# Altium footprint library RLC.PcbLib: 32 footprints (part 1 of 2)
Each footprint in its own frame and in the unit in brackets; x right, y up, seen from the top. Pads: shape width x height; smd on the part's side, far side on the other; paste and mask are expansions set on the pad; w line width, h text height; cw(c..) or ccw(c..) is an arc to the next point about the centre after c.
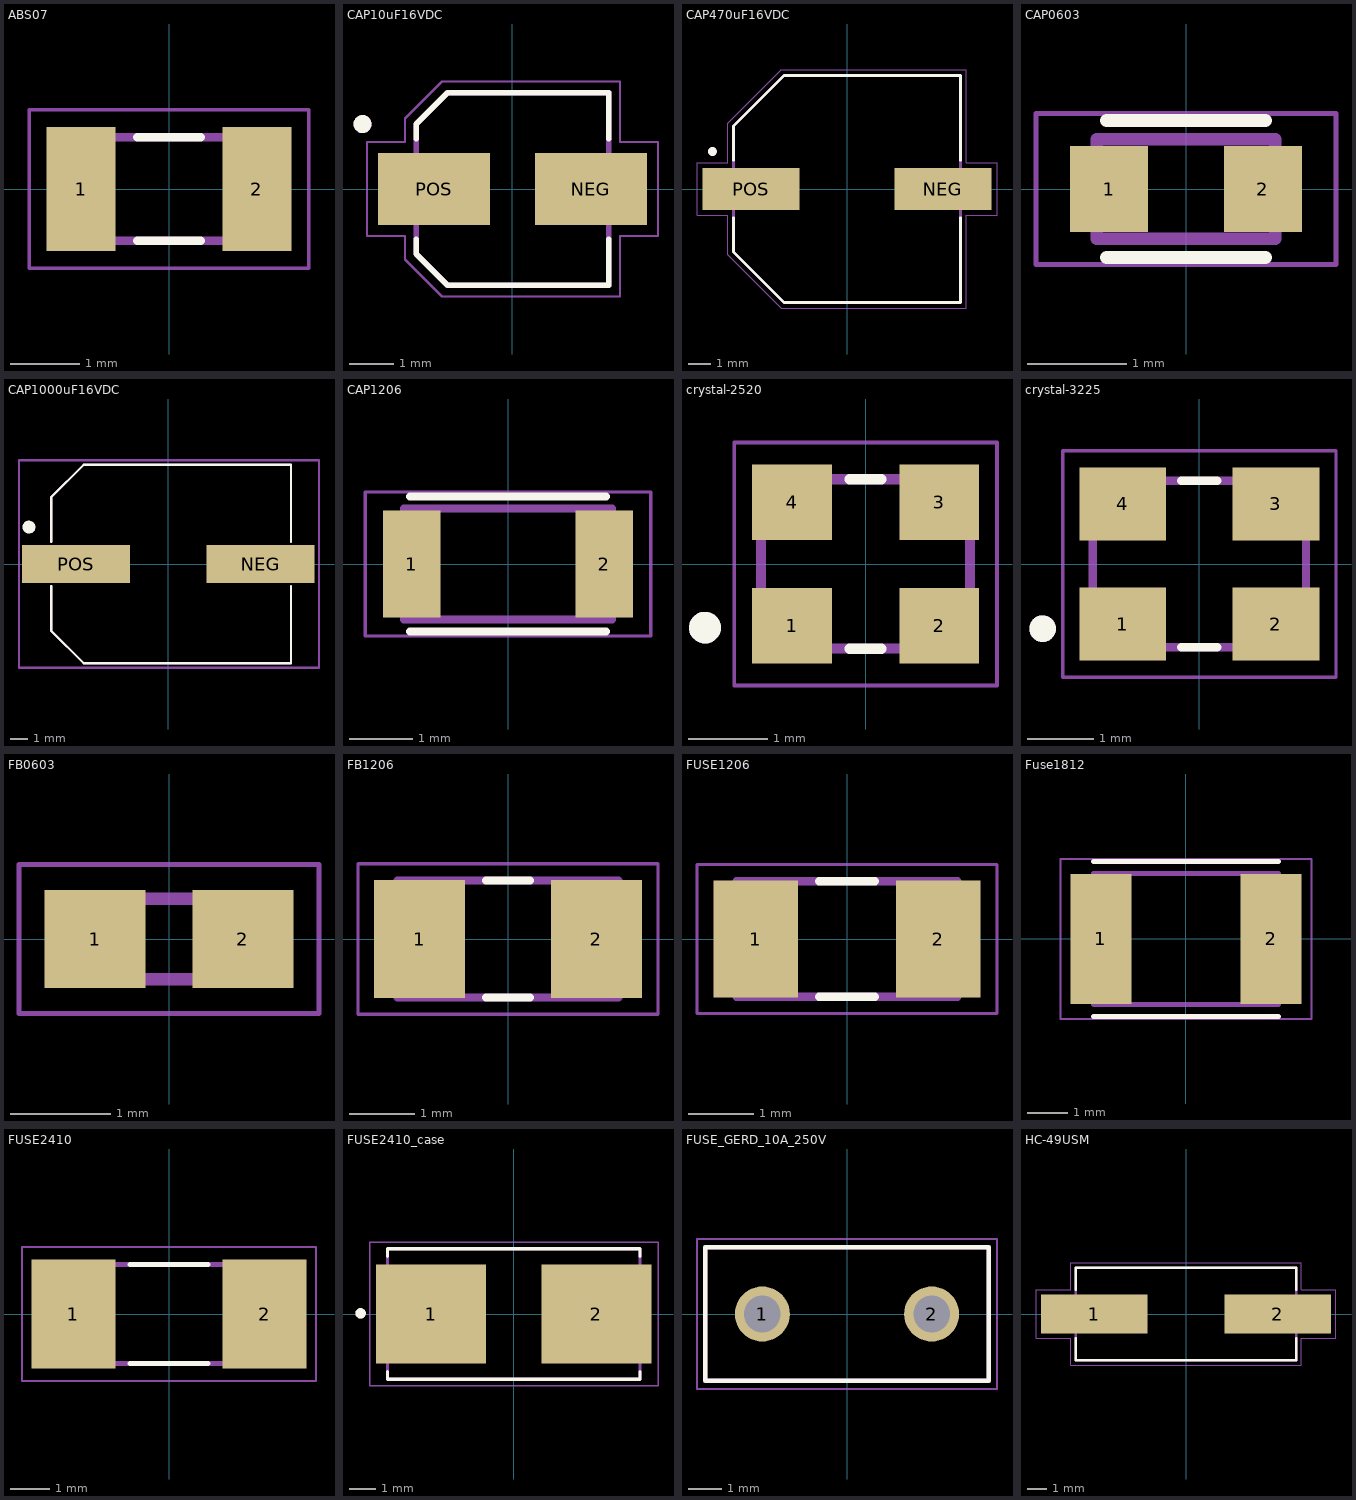
[diagram p0: the footprints below, top view; thin cyan lines are the x and y axes]

## ABS07 [mm] "ABS07"
height 0.9
pads (2):
  rect 1x1.8 smd: 1(-1.275,0) 2(1.275,0)
Top Overlay:
  lines w0.127: -0.455,-0.75 0.455,-0.75 ; -0.455,0.75 0.455,0.75
Mechanical 13:
  lines w0.127: -1.6,-0.75 1.6,-0.75 1.6,0.75 -1.6,0.75 -1.6,-0.75
Mechanical 15:
  lines w0.05: -2.025,-1.15 2.025,-1.15 2.025,1.15 -2.025,1.15 -2.025,-1.15
3D body "step_temp.STEP": height 0.9, standoff 0, extent -1.6,-0.75 1.6,0.75

## CAP10uF16VDC [mm] "CAP10uF16VDC"
pads (2):
  rect 2.5x1.6 smd: NEG(1.75,0) POS(-1.75,0)
Top Overlay:
  circle w0.2: c-3.35,1.45 r0.1
  lines w0.127: -2.15,-1.12 -2.15,-1.45 -1.45,-2.15 2.15,-2.15 2.15,-1.12 ; -2.15,1.12 -2.15,1.45 -1.45,2.15 2.15,2.15 2.15,1.12
Mechanical 13:
  circle w0.2: c-3.35,1.45 r0.1
  lines w0.127: -2.15,-1.45 -1.45,-2.15 2.15,-2.15 2.15,2.15 -1.45,2.15 -2.15,1.45 -2.15,-1.45
Mechanical 15:
  lines w0.05: -3.25,-1.05 -3.25,1.05 -2.4,1.05 -2.4,1.575 -1.575,2.4 2.4,2.4 2.4,1.05 3.25,1.05 3.25,-1.05 2.4,-1.05 2.4,-2.4 -1.575,-2.4 -2.4,-1.575 -2.4,-1.05 -3.25,-1.05
3D body "step_temp.STEP": height 5.84, standoff 0.04, extent -2.5,-2.15 2.5,2.15

## CAP470uF16VDC [mm] "CAP_16SVPE470M"
height 12.6
pads (2):
  rect 4.4x1.9 smd: NEG(4.35,0) POS(-4.35,0)
Top Overlay:
  circle w0.2: c-6.1,1.7 r0.1
  lines w0.127: -5.15,-1.3 -5.15,-2.85 -2.85,-5.15 5.15,-5.15 5.15,-1.3 ; -5.15,1.3 -5.15,2.85 -2.85,5.15 5.15,5.15 5.15,1.3
Mechanical 13:
  circle w0.2: c-6.1,1.7 r0.1
  lines w0.127: -5.15,-2.85 -2.85,-5.15 5.15,-5.15 5.15,5.15 -2.85,5.15 -5.15,2.85 -5.15,-2.85
Mechanical 15:
  lines w0.05: -6.8,-1.2 -5.4,-1.2 -5.4,-2.975 -2.975,-5.4 5.4,-5.4 5.4,-1.2 6.8,-1.2 6.8,1.2 5.4,1.2 5.4,5.4 -2.975,5.4 -5.4,2.975 -5.4,1.2 -6.8,1.2 -6.8,-1.2
3D body "step_temp.STEP": height 12.6, standoff 0, extent -5.5,-5.15 5.5,5.15

## CAP0603 [mil] "CAPC1608X50N"
pads (2):
  rect 31x34 smd: 1(-30.5,0) 2(30.5,0)
Top Overlay:
  lines w5: -31.5,-27.17 31.5,-27.17 ; -31.5,27.17 31.5,27.17
Mechanical 13:
  lines w5: -35.43,-19.68 35.43,-19.68 35.43,19.68 -35.43,19.68 -35.43,-19.68
Mechanical 15:
  lines w1.97: -59.45,-29.92 59.45,-29.92 59.45,29.92 -59.45,29.92 -59.45,-29.92
3D body "CAP0603.STEP": height 32.94, standoff 1.06, extent -31.5,-17.5 31.5,17.93

## CAP1000uF16VDC [mm] "CAP1000uF16VDC"
pads (2):
  rect 6.15x2.15 smd: NEG(5.252,0) POS(-5.252,0)
Top Overlay:
  circle w0.254: c-7.938,2.095 r0.09
  circle w0.254: c-7.954,2.1 r0.142
  circle w0.127: c-7.942,2.1 r0.305
  lines w0.127: -6.667,-1.27 -6.667,-3.81 -4.826,-5.651 6.985,-5.651 6.985,-1.27 ; -6.667,1.27 -6.667,3.81 -4.826,5.651 6.985,5.651 6.985,1.27
Mechanical 13:
  lines w0.127: -6.667,-1.27 -6.667,-3.81 -4.826,-5.651 6.985,-5.651 6.985,-1.3 ; -6.667,1.3 -6.667,3.81 -4.826,5.651 -3,5.651 6.985,5.651 6.985,1.27
Mechanical 15:
  lines w0.127: -8.509,-5.905 8.572,-5.905 8.572,5.905 -8.509,5.905 -8.509,-5.905
3D body "CAP1000uF16VDC.stp": height 10.72, standoff 0, extent -5.855,-5.155 5.855,5.155

## CAP1206 [mil] "CAPC3115X65N"
pads (2):
  rect 36x67 smd: 1(-60,0) 2(60,0)
Top Overlay:
  lines w5: -61.02,-41.93 61.02,-41.93 ; -61.02,41.93 61.02,41.93
Mechanical 13:
  lines w5: -64.96,-34.65 64.96,-34.65 64.96,34.65 -64.96,34.65 -64.96,-34.65
Mechanical 15:
  lines w1.97: -88.98,-44.88 88.98,-44.88 88.98,44.88 -88.98,44.88 -88.98,-44.88
3D body "CAP1206.step": height 39.37, standoff 0, extent -62.99,-31.5 62.99,31.5

## crystal-2520 [mm] "crystal-2520"
pads (4):
  rect 1x0.95 smd: 1(-0.925,-0.775) 2(0.925,-0.775) 3(0.925,0.775) 4(-0.925,0.775)
Top Overlay:
  circle w0.2: c-2.019,-0.8 r0.1
  lines w0.127: -0.2,-1.065 0.2,-1.065 ; -0.2,1.065 0.2,1.065
Mechanical 13:
  circle w0.2: c-2.019,-0.8 r0.1
  lines w0.127: -1.312,-1.063 1.312,-1.063 1.312,1.065 -1.312,1.065 -1.312,-1.063
Mechanical 15:
  lines w0.05: -1.651,-1.524 1.651,-1.524 1.651,1.524 -1.651,1.524 -1.651,-1.524
3D body "QFN_2520_4pins.STEP": height 0.8, standoff 0, extent -1.251,-1 1.251,1

## crystal-3225 [mm] "crystal-3225"
pads (4):
  rect 1.3x1.1 smd: 1(-1.15,-0.9) 2(1.15,-0.9) 3(1.15,0.9) 4(-1.15,0.9)
Top Overlay:
  circle w0.2: c-2.35,-0.97 r0.1
  lines w0.127: -0.27,-1.25 0.27,-1.25 ; -0.27,1.25 0.27,1.25
Mechanical 13:
  circle w0.2: c-2.35,-0.97 r0.1
  lines w0.127: -1.6,-1.25 1.6,-1.25 1.6,1.25 -1.6,1.25 -1.6,-1.25
Mechanical 15:
  lines w0.05: -2.05,-1.7 2.05,-1.7 2.05,1.7 -2.05,1.7 -2.05,-1.7
3D body "step_temp.STEP": height 0.8, standoff 0, extent -1.6,-1.25 1.6,1.25

## FB0603 [mm] "BEADC1608X75N"
pads (2):
  rect 1x0.97 smd: 1(-0.735,0) 2(0.735,0)
Mechanical 13:
  lines w0.127: -0.8,-0.4 0.8,-0.4 0.8,0.4 -0.8,0.4 -0.8,-0.4
Mechanical 15:
  lines w0.05: -1.49,-0.74 1.49,-0.74 1.49,0.74 -1.49,0.74 -1.49,-0.74
3D body "step_temp.STEP": height 0.95, standoff 0, extent -0.8,-0.4 0.8,0.4

## FB1206 [mm] "BEADC3216X180N"
pads (2):
  rect 1.4x1.82 smd: 1(-1.36,0) 2(1.36,0)
Top Overlay:
  lines w0.127: -0.34,-0.9 0.34,-0.9 ; -0.34,0.9 0.34,0.9
Mechanical 13:
  lines w0.127: -1.7,-0.9 1.7,-0.9 1.7,0.9 -1.7,0.9 -1.7,-0.9
Mechanical 15:
  lines w0.05: -2.308,-1.158 2.308,-1.158 2.308,1.158 -2.308,1.158 -2.308,-1.158
3D body "BLM31KN102SH1L.STEP": height 1.6, standoff 0, extent -1.6,-0.898 1.6,0.902

## FUSE1206 [mm] "FUSE1206"
pads (2):
  rect 1.3x1.8 smd: 1(-1.405,0) 2(1.405,0)
Top Overlay:
  lines w0.127: -0.43,-0.89 0.43,-0.89 ; -0.43,0.89 0.43,0.89
Mechanical 13:
  lines w0.127: -1.7,-0.89 1.7,-0.89 1.7,0.89 -1.7,0.89 -1.7,-0.89
Mechanical 15:
  lines w0.05: -2.308,-1.148 2.308,-1.148 2.308,1.148 -2.308,1.148 -2.308,-1.148
3D body "C1H25.STEP": height 0.85, standoff 0, extent -1.6,-0.79 1.6,0.79

## Fuse1812 [mm] "MF-MSMF150/24X-2"
pads (2):
  rect 1.5x3.2 smd: 1(-2.1,0) 2(2.1,0)
Top Overlay:
  lines w0.127: -2.275,-1.913 2.275,-1.913 ; -2.275,1.913 2.275,1.913
Mechanical 13:
  lines w0.127: -2.275,-1.62 2.275,-1.62 2.275,1.62 -2.275,1.62 -2.275,-1.62
Mechanical 15:
  lines w0.05: -3.1,-1.977 -3.1,1.977 3.1,1.977 3.1,-1.977 -3.1,-1.977
3D body "step_temp.STEP": height 0.85, standoff 0, extent -2.275,-1.62 2.275,1.62

## FUSE2410 [mm] "FUSE2410"
pads (2):
  rect 2.15x2.8 smd: 1(-2.455,0) 2(2.455,0)
Top Overlay:
  lines w0.127: -1,-1.27 1,-1.27 ; -1,1.27 1,1.27
Mechanical 13:
  lines w0.127: -3.05,-1.27 -3.05,1.27 3.05,1.27 3.05,-1.27 -3.05,-1.27
Mechanical 15:
  lines w0.05: -3.78,-1.72 3.78,-1.72 3.78,1.72 -3.78,1.72 -3.78,-1.72
3D body "0679L0250-01--3DModel-STEP-56544.STEP": height 2.54, standoff 0, extent -3.05,-1.397 3.05,1.393

## FUSE2410_case [mil] "FUSE_01550900M_case"
height 150
pads (2):
  rect 167x150 smd: 1(-125.5,0) 2(125.5,0)
Top Overlay:
  circle w7.87: c-232.37,1 r3.94
  lines w5: -191.5,-87.6 -191.5,-99 191.5,-99 191.5,-87.6 ; -191.5,87.6 -191.5,99 191.5,99 191.5,87.6
Mechanical 13:
  circle w7.87: c-232.37,1 r3.94
  lines w5: -191.5,-99 -191.5,99 191.5,99 191.5,-99 -191.5,-99
Mechanical 15:
  lines w1.97: -218.84,-108.84 218.84,-108.84 218.84,108.84 -218.84,108.84 -218.84,-108.84
3D body "step_temp.STEP": height 150, standoff 0, extent -191.54,-99.02 191.54,99.02

## FUSE_GERD_10A_250V [mm] "FUSE GERD 10A 250V"
height 8
pads (2):
  round 1.65 hole 1.1: 1(-2.54,0) 2(2.54,0)
Top Overlay:
  lines w0.127: -4.25,-2 4.25,-2 4.25,2 -4.25,2 -4.25,-2
Mechanical 13:
  lines w0.127: -4.25,-2 4.25,-2 4.25,2 -4.25,2 -4.25,-2
Mechanical 15:
  lines w0.05: -4.5,-2.25 -4.5,2.25 4.5,2.25 4.5,-2.25 -4.5,-2.25
3D body "36913150000.STEP": height 8.03, standoff -19.07, extent -4.25,-2 4.25,2

## HC-49USM [mm] "CRYSTAL_HC-49USM"
pads (2):
  rect 5.5x2 smd: 1(-4.75,0) 2(4.75,0)
Top Overlay:
  lines w0.127: -5.7,-1.254 -5.7,-2.4 5.7,-2.4 5.7,-1.254 ; -5.7,1.254 -5.7,2.4 5.7,2.4 5.7,1.254
Mechanical 13:
  lines w0.127: -5.7,-2.4 -5.7,2.4 5.7,2.4 5.7,-2.4 -5.7,-2.4
Mechanical 15:
  lines w0.05: -7.75,-1.25 -5.95,-1.25 -5.95,-2.65 5.95,-2.65 5.95,-1.25 7.75,-1.25 7.75,1.25 5.95,1.25 5.95,2.65 -5.95,2.65 -5.95,1.25 -7.75,1.25 -7.75,-1.25
3D body "ECS-200-S-5P-TR.STEP": height 4.3, standoff 0, extent -6.6,-2.39 6.6,2.41